# Altium schematic symbol library li-ion-18650-capacity-meter.SchLib: 18 symbols
Pins are listed as number, name and electrical type; pins without a type are passive.

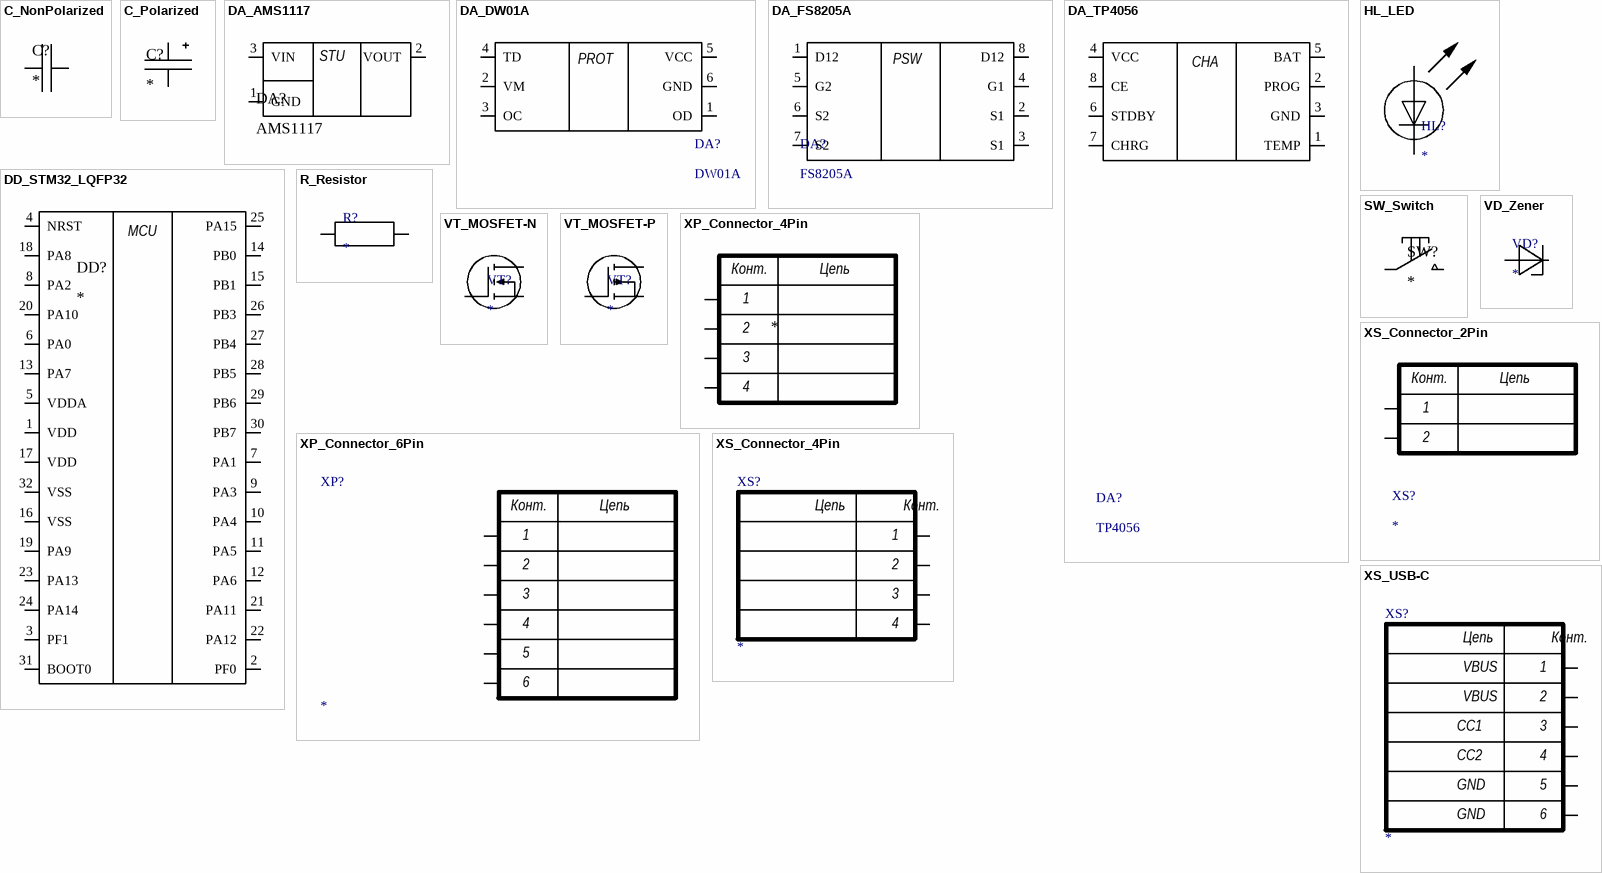
[diagram p0: symbols C_NonPolarized to XS_USB-C]

## C_NonPolarized
designator C?
Multilayer ceramic capacitor, 10% tolerance; Value: *
footprint C_1206
pins: 1, 2

## C_Polarized
designator C?
Polarized electrolytic capacitor, 10 µF, 16 V, 20% tolerance; Value: *
footprint C_ECAP_SMD_4mm
pins: 1, 2

## DA_AMS1117
designator DA?, comment AMS1117
Fixed-output linear voltage regulator, 3.3 V; Value: AMS1117
footprint DA_SOT-223_AMS1117
pins: 1 GND, 2 VOUT, 3 VIN
text: STU

## DA_DW01A
designator DA?, comment DW01A
Single-cell Li-ion battery protection controller; Value: DW01A
footprint DA_SOT-23-6 (SOT143-4 per SP0503BAHTG (WRONG PIN ORDER))
pins: 1 OD, 2 VM, 3 OC, 4 TD, 5 VCC, 6 GND
text: PROT

## DA_FS8205A
designator DA?, comment FS8205A
Dual N-channel power MOSFET; Value: FS8205A
footprint DA_TSSOP-8_FS8205A (TSSOP, 8-Leads, Body 3.00x4.40mm, Pitch 0.65mm, IPC Medium Density)
pins: 1 D12, 2 S1, 3 S1, 4 G1, 5 G2, 6 S2, 7 S2, 8 D12
text: PSW

## DA_TP4056
designator DA?, comment TP4056
Single-cell linear Li-ion battery charger with charge-status outputs; Value: TP4056
footprint DA_TP4056
pins: 1 TEMP, 2 PROG, 3 GND, 4 VCC, 5 BAT, 6 STDBY, 7 CHRG, 8 CE
text: CHA

## DD_STM32_LQFP32
designator DD?
32-bit Arm Cortex-M0 microcontroller, 48 MHz, 64 KB Flash; Value: *
footprint DD_LQFP-32_STM32
pins: 1 VDD, 2 PF0, 3 PF1, 4 NRST, 5 VDDA, 6 PA0, 7 PA1, 8 PA2, 9 PA3, 10 PA4, 11 PA5, 12 PA6, 13 PA7, 14 PB0, 15 PB1, 16 VSS, 17 VDD, 18 PA8, 19 PA9, 20 PA10, 21 PA11, 22 PA12, 23 PA13, 24 PA14, 25 PA15, 26 PB3, 27 PB4, 28 PB5, 29 PB6, 30 PB7, 31 BOOT0, 32 VSS
text: MCU

## HL_LED
designator HL?
Indicator LED, 60-degree viewing angle; Value: *
footprint HL_LED_Green_3mm
footprint HL_LED_Red_3mm
footprint HL_LED_Yellow_3mm
pins: 1, 2

## R_Resistor
designator R?
Fixed resistor; Value: *
footprint R_1206
footprint R_C2-23
pins: 1, 2

## SW_Switch
designator SW?
Two-terminal switch; Value: *
footprint SW_Button_2Pin
footprint SW_Button_SMD
footprint SW_KLS7_4Pin_H17
pins: 1, 2

## VD_Zener
designator VD?
Zener diode, 3.3 V, 0.2 W; Value: *
footprint VD_SOD-323 (SOD, 2-Leads, Body 1.25x2.50mm, IPC Medium Density)
pins: 1, 2

## VT_MOSFET-N
designator VT?
N-channel power MOSFET, 20 V; Value: *
footprint VT_SOT-23
pins: 1 И, 2 З, 3 С

## VT_MOSFET-P
designator VT?
P-channel power MOSFET, -20 V; Value: *
footprint VT_SOT-23
pins: 1 И, 2 З, 3 С

## XP_Connector_4Pin
designator XP?
4-position plug connector; Value: *
footprint X_XH_4Pin_2.54mm
pins: 1, 2, 3, 4
text: Конт.; Цепь

## XP_Connector_6Pin
designator XP?
6-position plug connector; Value: *
pins: 1, 2, 3, 4, 5, 6
text: Конт.; Цепь

## XS_Connector_2Pin
designator XS?
Single-cell 18650 battery holder; Value: *
footprint X_KLS5_18650_D
pins: 1, 2
text: Конт.; Цепь

## XS_Connector_4Pin
designator XS?
4-position socket connector; Value: *
footprint X_Arduino_4Pin
pins: 1, 2, 3, 4
text: Цепь; Конт.

## XS_USB-C
designator XS?
USB Type-C power receptacle, 6 contacts; Value: *
footprint X_USB-C_6Pin
pins: C1, C2, C3, C4, C5, C6
text: Цепь; Конт.; VBUS; 1; 2; CC1; 3; CC2; 4; GND; 5; 6